# Altium footprint library Resistor$.PcbLib: 99 footprints (part 2 of 7)
Each footprint in its own frame and in the unit in brackets; x right, y up, seen from the top. Pads: shape width x height; smd on the part's side, far side on the other; paste and mask are expansions set on the pad; w line width, h text height; cw(c..) or ccw(c..) is an arc to the next point about the centre after c.
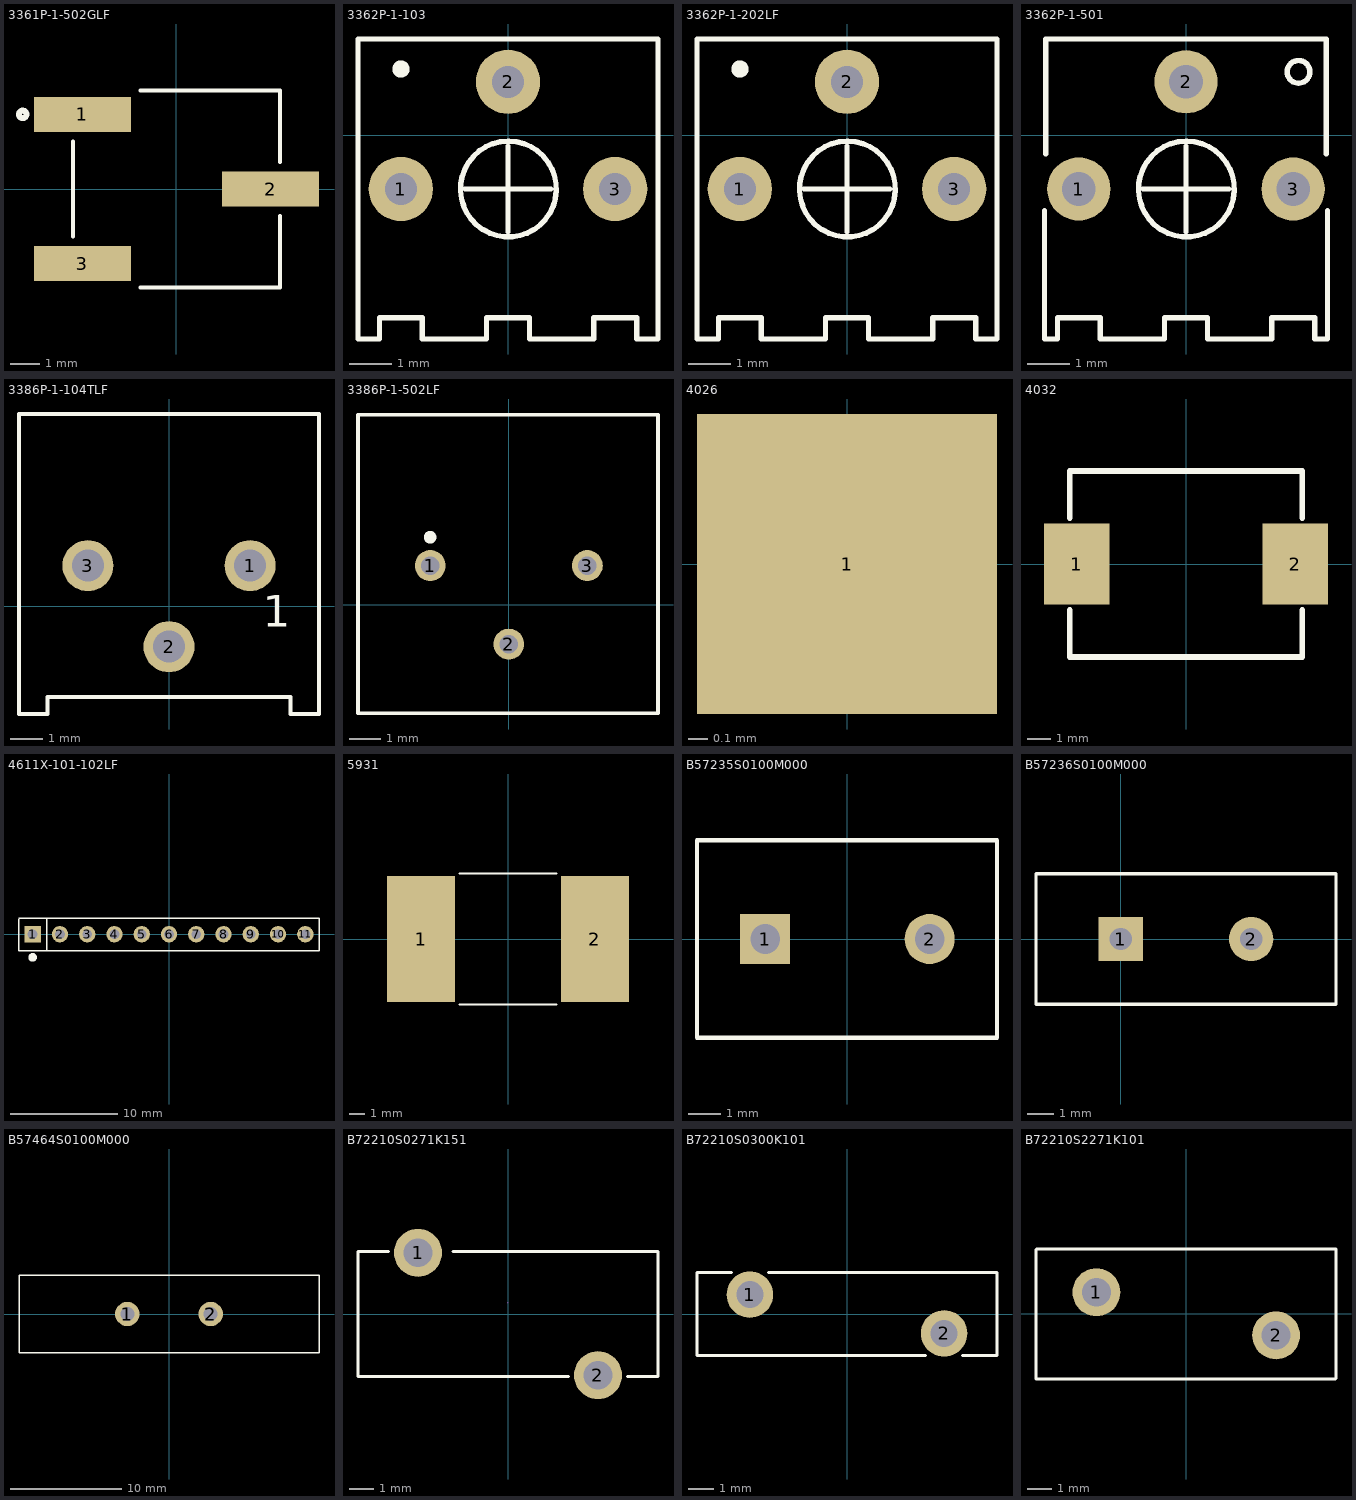
[diagram p1: the footprints below, top view; thin cyan lines are the x and y axes]

## 3361P-1-502GLF [mm]
pads (3):
  rect 3.3x1.19 smd: 1(-3.2,2.54) 2(3.2,0) 3(-3.2,-2.54)
Top Overlay:
  circle w0.2: c-5.232,2.54 r0.127
  lines w0.127: -3.52,-1.625 -3.52,1.625 ; -1.23,-3.355 3.52,-3.355 3.52,-0.915 ; -1.23,3.355 3.52,3.355 3.52,0.915
3D body "3361p001.stp": height 5.23, standoff 0, extent -4.496,-3.456 4.038,3.249

## 3362P-1-103 [mil]
pads (3):
  round 60 hole 30 paste-99999 mask+2: 1(-100,-50) 2(0,50) 3(100,-50)
Top Overlay:
  lines w5: -40,-50 40,-50 ; 0,-90 0,-10 ; 0,-5.3 ccw(c0.4,-50.02) 0.8,-5.3 ; 140,-30 140,90 -140,90 -140,-30 -140,-170 -140,-190 -120,-190 -120,-170 -80,-170 -80,-190 -20,-190 -20,-170 20,-170 20,-190 80,-190 80,-170 120,-170 120,-190 140,-190 140,-170 140,-10
  lines w10: -100,65 ccw(c-99.95,62) -99.9,65
Mechanical 15:
  lines w0.1: -0.01,-36.26 0.01,-36.24
3D body "C118956.step": height 183.86, standoff -142.12, extent -135.83,-189.57 135.83,90

## 3362P-1-202LF [mil]
pads (3):
  round 60 hole 30 paste-99999 mask+2: 1(-100,-50) 2(0,50) 3(100,-50)
Top Overlay:
  lines w5: -40,-50 40,-50 ; 0,-90 0,-10 ; 0,-5.3 ccw(c0.4,-50.02) 0.8,-5.3 ; 140,-30 140,90 -140,90 -140,-30 -140,-170 -140,-190 -120,-190 -120,-170 -80,-170 -80,-190 -20,-190 -20,-170 20,-170 20,-190 80,-190 80,-170 120,-170 120,-190 140,-190 140,-170 140,-10
  lines w10: -100,65 ccw(c-99.95,62) -99.9,65
3D body "C111654.step": height 183.86, standoff -142.12, extent -135.83,-189.57 135.83,90

## 3362P-1-501 [mm]
pads (3):
  round 1.5 hole 0.8 paste-2539.97 mask+0.051: 1(-2.54,-1.27) 2(0,1.27) 3(2.54,-1.27)
Top Overlay:
  lines w0.127: -3.353,-4.826 -3.353,-1.778 ; -3.327,-4.826 -3.048,-4.826 -3.048,-4.318 -2.032,-4.318 -2.032,-4.826 -0.508,-4.826 -0.508,-4.318 0.508,-4.318 0.508,-4.826 2.032,-4.826 2.032,-4.318 3.048,-4.318 3.048,-4.826 3.327,-4.826 ; -3.327,-0.432 -3.327,2.286 3.327,2.286 3.327,-0.432 ; -1.016,-1.27 1.016,-1.27 ; 0,-2.286 0,-0.254 ; 0,-0.135 ccw(c0.01,-1.27) 0.02,-0.135 ; 2.667,1.778 ccw(c2.668,1.508) 2.67,1.778 ; 3.353,-4.826 3.353,-1.778
3D body "C118916.step": height 4.7, standoff -5, extent -3.3,-4.762 3.3,2.229

## 3386P-1-104TLF [mm]
pads (3):
  round 1.6 hole 1 paste-2539.97 mask+0.051: 1(2.54,1.27) 2(0,-1.27) 3(-2.54,1.27)
Top Overlay:
  lines w0.127: -4.699,-3.378 -3.81,-3.378 -3.81,-2.845 3.81,-2.845 3.81,-3.378 4.699,-3.378 4.699,6.02 -4.699,6.02 -4.699,-3.378
  text "1" at 2.943,-0.638 h1
3D body "C116303.step": height 4.83, standoff -5, extent -4.765,-3.465 4.765,6.066

## 3386P-1-502LF [mm]
pads (3):
  round 1 hole 0.6: 1(-2.54,1.27) 2(0,-1.27) 3(2.54,1.27)
Top Overlay:
  circle w0.3: c-2.544,2.186 r0.054
  lines w0.127: -4.877,6.147 -4.877,-3.505 4.826,-3.505 4.826,6.096 ; -4.851,6.147 4.826,6.147
3D body "3386P-1-502LF.STEP": height 4.83, standoff -6.86, extent -4.788,-3.467 4.737,6.058

## 4026 [mil]
pads (1):
  rect 60x60 smd: 1(0,0)

## 4032 [mm]
pads (2):
  rect 2.8x3.5 smd: 1(-4.7,0) 2(4.7,0)
Top Overlay:
  lines w0.254: -5,-1.981 -5,-4 5,-4 ; -5,1.981 -5,4 5,4 5,1.981 ; 5,-1.981 5,-4 ; 5,-4 5,-4
3D body "C2935515.step": height 3.5, standoff 0, extent -5.1,-4 5.1,4

## 4611X-101-102LF [mil]
pads (11):
  rect 60x60 hole 36 paste-99999 mask+1.97: 1(-500,0)
  round 60 hole 36 paste-99999 mask+1.97: 2(-400,0) 3(-300,0) 4(-200,0) 5(-100,0) 6(0,0) 7(100,0) 8(200,0) 9(300,0) 10(400,0) 11(500,0)
Top Overlay:
  circle w15.75: c-500,-85 r7.87
  lines w5: -550,55 -550,-50 -550,-60 550,-60 550,-40 550,50 ; -550,57.71 550,57.71 550,44.71 ; -448.84,-60 -448.84,57.71
3D body "C1357914.step": height 228.35, standoff -137.79, extent -557.42,-56.91 556.76,56.95

## 5931 [mil]
pads (2):
  rect 171x318 smd: 1(-219,0) 2(219,0)
Top Overlay:
  lines w6: -121.85,-165 121.85,-165 ; -121.85,165 121.85,165
3D body "RES_PU5931_4mOHM_YAG.step": height 15, standoff 0, extent -300,-157.48 300,157.48

## B57235S0100M000 [mil]
pads (2):
  rect 60x60 hole 35.43 paste-99999 mask+1.97: 1(-98.43,0)
  round 60 hole 35.43 paste-99999 mask+1.97: 2(98.43,0)
Top Overlay:
  lines w5: -180,-118.11 -180,118.11 179,118.11 179,-118.11 -180,-118.11
3D body "Resistor.step": height 475.92, standoff -126.88, extent -177.04,-117.99 177.1,117.99

## B57236S0100M000 [mm]
pads (2):
  rect 1.7x1.7 hole 0.85: 1(0,0)
  round 1.7 hole 0.85: 2(5,0)
Top Overlay:
  lines w0.127: -3.25,-2.5 -3.25,2.5 8.25,2.5 8.25,-2.5 -3.25,-2.5
3D body "step_temp.STEP": height 15.98, standoff -25, extent -3.25,-3 8.25,3

## B57464S0100M000 [mm]
pads (2):
  round 2.2 hole 1.25: 1(-3.75,0) 2(3.75,0)
Top Overlay:
  lines w0.127: -13.5,-3.5 -13.5,3.5 13.5,3.5 13.5,-3.5 -13.5,-3.5
3D body "s464.step": height 31, standoff -25, extent -13,-3.5 13,3.5

## B72210S0271K151 [mm]
pads (2):
  round 2 hole 1.2 paste-2539.97 mask+0.051: 1(-3.75,2.55) 2(3.75,-2.55)
Top Overlay:
  lines w0.127: -4.981,2.6 -6.25,2.6 -6.25,-2.6 2.519,-2.6 ; -2.286,2.6 6.25,2.6 6.25,-2.6 ; 4.981,-2.6 6.223,-2.6
Mechanical 15:
  lines w0.003: 0,0.479 0,0.48
3D body "C125512.step": height 13.6, standoff -3.15, extent -6.25,-3.254 6.25,3.254

## B72210S0300K101 [mm]
pads (2):
  round 1.8 hole 1.05: 1(-3.75,0.75) 2(3.75,-0.75)
Top Overlay:
  lines w0.127: -4.47,1.6 -5.791,1.6 -5.791,-1.6 3.023,-1.6 ; -3.023,1.6 5.791,1.6 5.791,-1.6 4.47,-1.6
3D body "s10k275e2.step": height 13.75, standoff -24.18, extent -5.75,-1.549 5.75,1.55

## B72210S2271K101 [mm]
pads (2):
  round 2 hole 1.2 paste-2539.97 mask+0.051: 1(-3.749,0.899) 2(3.749,-0.899)
Top Overlay:
  lines w0.127: -6.271,2.684 -6.271,-2.716 6.231,-2.716 ; -6.25,2.7 6.25,2.7 6.25,-2.7
3D body "C210564.step": height 13.35, standoff -3.4, extent -6.25,-2.696 6.246,2.696